# Altium schematic symbol library XTAL_OSCILATOR_CLK-BUFFER.SchLib: 3 symbols
Pins are listed as number, name and electrical type; pins without a type are passive.

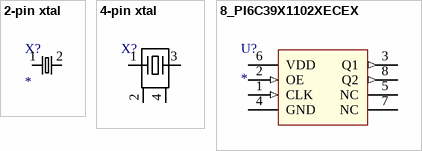
[diagram p0: symbols 2-pin xtal to 8_PI6C39X1102XECEX]

## 2-pin xtal
designator X?
Supplier 1: Avnet; Supplier Part Number 1: ABLS-12.288MHZ-K4T; type: *
footprint HC-49S_SMD_XTAL
pins: 1 3, 2

## 4-pin xtal
designator X?  (value not drawn)
ABMM-16.000MHZ-12-R100-N2-XTAL; Supplier 1: Avnet; Supplier Part Number 1: ABM8-16.000MHZ-7-1-U-T
footprint 7050_SMD_XTAL (ABMM-16.000MHZ-12-R100-N2)
pins: 1, 2 (power), 3, 4 (power)

## 8_PI6C39X1102XECEX
designator U?
2 outputs, max 100MHz, Vcc: 1.5V,1.8V,2.5V,3.3V; Supplier 1: Mouser; Supplier Part Number 1: 621-PI6C39X1102XECEX
footprint DFN-8_PI6C39X1102XECEX (2 outputs, max 100MHz, Vcc: 1.5V,1.8V,2.5V,3.3V)
pins: 1 CLK (in), 2 OE (in), 3 Q1 (out), 4 GND (power), 5 NC, 6 VDD (power), 7 NC, 8 Q2 (out)